# Altium schematic symbol library Altium_Library.SchLib: 822 symbols (part 5 of 17)
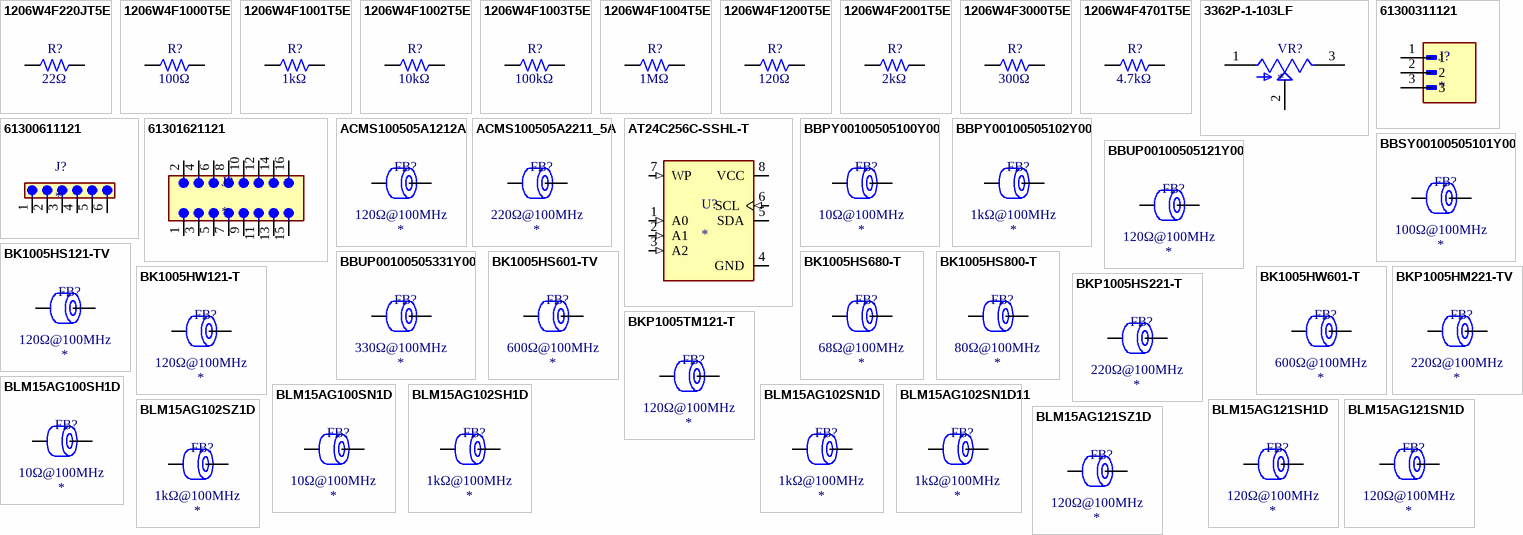
[diagram p24: symbols 1206W4F220JT5E to BLM15AG121SZ1D]

## BLM15AG102SH1D
designator FB?  Impedance @ Frequency: 1kΩ@100MHz
Ferrite, 1kΩ@100MHz, ±25%, 1Ω, 200mA, SMD 0402; Manufacturer: Murata Electronics; Manufacturer Part Number: BLM15AG102SH1D; Package Size: 0402; JLCPCB Basic Part: No; JLCPCB Part Number: C160967; Supplier 1: LCSC; Category: Ferrite Beads; Supplier Part Number 1: C160967; Tolerance: ±25%; Rated Current: 200mA; DC Resistance: 1Ω; RoHS: Yes; ComponentLink1Description: Datasheet; ComponentLink1URL: https://wmsc.lcsc.com/wmsc/upload/file/pdf/v2/lcsc/1811081514_Murata-Electronics-BLM15AG102SH1D_C160967.pdf; ComponentLink2Description: JLCPCB Part URL; ComponentLink2URL: https://jlcpcb.com/partdetail/C160967; ComponentLink3Description: LCSC Part URL; ComponentLink3URL: https://lcsc.com/product-detail/Ferrite-Beads_Murata-Electronics-Murata-Electronics-BLM15AG102SH1D_C160967.html
footprint FB-0402 (0402 (1005M) Ferrite)
pins: 1, 2

## BLM15AG102SN1D
designator FB?  Impedance @ Frequency: 1kΩ@100MHz
Ferrite, 1kΩ@100MHz, ±25%, 650mΩ, 300mA, SMD 0402; Manufacturer: Murata Electronics; Manufacturer Part Number: BLM15AG102SN1D; Package Size: 0402; JLCPCB Basic Part: No; JLCPCB Part Number: C76883; Supplier 1: LCSC; Category: Ferrite Beads; Supplier Part Number 1: C76883; Tolerance: ±25%; Rated Current: 300mA; DC Resistance: 650mΩ; RoHS: Yes; ComponentLink1Description: Datasheet; ComponentLink1URL: https://wmsc.lcsc.com/wmsc/upload/file/pdf/v2/lcsc/2304140030_Murata-Electronics-BLM15AG102SN1D_C76883.pdf; ComponentLink2Description: JLCPCB Part URL; ComponentLink2URL: https://jlcpcb.com/partdetail/C76883; ComponentLink3Description: LCSC Part URL; ComponentLink3URL: https://lcsc.com/product-detail/Ferrite-Beads_Murata-Electronics-Murata-Electronics-BLM15AG102SN1D_C76883.html
footprint FB-0402 (0402 (1005M) Ferrite)
pins: 1, 2

## BLM15AG102SN1D11
designator FB?  Impedance @ Frequency: 1kΩ@100MHz
Ferrite, 1kΩ@100MHz, ±25%, 650mΩ, 300mA, SMD 0402; Manufacturer: Murata Electronics; Manufacturer Part Number: BLM15AG102SN1D11; Package Size: 0402; JLCPCB Basic Part: No; JLCPCB Part Number: C882959; Supplier 1: LCSC; Category: Ferrite Beads; Supplier Part Number 1: C882959; Tolerance: ±25%; Rated Current: 300mA; DC Resistance: 650mΩ; RoHS: Yes; ComponentLink1Description: Datasheet; ComponentLink1URL: https://wmsc.lcsc.com/wmsc/upload/file/pdf/v2/lcsc/2011231238_Murata-Electronics-BLM15AG102SN1D11_C882959.pdf; ComponentLink2Description: JLCPCB Part URL; ComponentLink2URL: https://jlcpcb.com/partdetail/C882959; ComponentLink3Description: LCSC Part URL; ComponentLink3URL: https://lcsc.com/product-detail/Ferrite-Beads_Murata-Electronics-Murata-Electronics-BLM15AG102SN1D11_C882959.html
footprint FB-0402 (0402 (1005M) Ferrite)
pins: 1, 2

## BLM15AG102SZ1D
designator FB?  Impedance @ Frequency: 1kΩ@100MHz
Ferrite, 1kΩ@100MHz, ±25%, 650mΩ, 300mA, SMD 0402; Manufacturer: Murata Electronics; Manufacturer Part Number: BLM15AG102SZ1D; Package Size: 0402; JLCPCB Basic Part: No; JLCPCB Part Number: C710326; Supplier 1: LCSC; Category: Ferrite Beads; Supplier Part Number 1: C710326; Tolerance: ±25%; Rated Current: 300mA; DC Resistance: 650mΩ; RoHS: Yes; ComponentLink1Description: Datasheet; ComponentLink1URL: https://wmsc.lcsc.com/wmsc/upload/file/pdf/v2/lcsc/2304140030_Murata-Electronics-BLM15AG102SZ1D_C710326.pdf; ComponentLink2Description: JLCPCB Part URL; ComponentLink2URL: https://jlcpcb.com/partdetail/C710326; ComponentLink3Description: LCSC Part URL; ComponentLink3URL: https://lcsc.com/product-detail/Ferrite-Beads_Murata-Electronics-Murata-Electronics-BLM15AG102SZ1D_C710326.html
footprint FB-0402 (0402 (1005M) Ferrite)
pins: 1, 2

## BLM15AG121SH1D
designator FB?  Impedance @ Frequency: 120Ω@100MHz
Ferrite, 120Ω@100MHz, ±25%, 250mΩ, 500mA, SMD 0402; Manufacturer: Murata Electronics; Manufacturer Part Number: BLM15AG121SH1D; Package Size: 0402; JLCPCB Basic Part: No; JLCPCB Part Number: C91573; Supplier 1: LCSC; Category: Ferrite Beads; Supplier Part Number 1: C91573; Tolerance: ±25%; Rated Current: 500mA; DC Resistance: 250mΩ; RoHS: Yes; ComponentLink1Description: Datasheet; ComponentLink1URL: https://wmsc.lcsc.com/wmsc/upload/file/pdf/v2/lcsc/1810232207_Murata-Electronics-BLM15AG121SH1D_C91573.pdf; ComponentLink2Description: JLCPCB Part URL; ComponentLink2URL: https://jlcpcb.com/partdetail/C91573; ComponentLink3Description: LCSC Part URL; ComponentLink3URL: https://lcsc.com/product-detail/Ferrite-Beads_Murata-Electronics-Murata-Electronics-BLM15AG121SH1D_C91573.html
footprint FB-0402 (0402 (1005M) Ferrite)
pins: 1, 2

## BLM15AG121SN1D
designator FB?  Impedance @ Frequency: 120Ω@100MHz
Ferrite, 120Ω@100MHz, ±25%, 250mΩ, 500mA, SMD 0402; Manufacturer: Murata Electronics; Manufacturer Part Number: BLM15AG121SN1D; Package Size: 0402; JLCPCB Basic Part: No; JLCPCB Part Number: C85812; Supplier 1: LCSC; Category: Ferrite Beads; Supplier Part Number 1: C85812; Tolerance: ±25%; Rated Current: 500mA; DC Resistance: 250mΩ; RoHS: Yes; ComponentLink1Description: Datasheet; ComponentLink1URL: https://wmsc.lcsc.com/wmsc/upload/file/pdf/v2/lcsc/2304140030_Murata-Electronics-BLM15AG121SN1D_C85812.pdf; ComponentLink2Description: JLCPCB Part URL; ComponentLink2URL: https://jlcpcb.com/partdetail/C85812; ComponentLink3Description: LCSC Part URL; ComponentLink3URL: https://lcsc.com/product-detail/Ferrite-Beads_Murata-Electronics-Murata-Electronics-BLM15AG121SN1D_C85812.html
footprint FB-0402 (0402 (1005M) Ferrite)
pins: 1, 2

## BLM15AG121SZ1D
designator FB?  Impedance @ Frequency: 120Ω@100MHz
Ferrite, 120Ω@100MHz, ±25%, 190mΩ, 500mA, SMD 0402; Manufacturer: Murata Electronics; Manufacturer Part Number: BLM15AG121SZ1D; Package Size: 0402; JLCPCB Basic Part: No; JLCPCB Part Number: C2661926; Supplier 1: LCSC; Category: Ferrite Beads; Supplier Part Number 1: C2661926; Tolerance: ±25%; Rated Current: 500mA; DC Resistance: 190mΩ; RoHS: Yes; ComponentLink1Description: Datasheet; ComponentLink1URL: https://wmsc.lcsc.com/wmsc/upload/file/pdf/v2/lcsc/2108070930_Murata-Electronics-BLM15AG121SZ1D_C2661926.pdf; ComponentLink2Description: JLCPCB Part URL; ComponentLink2URL: https://jlcpcb.com/partdetail/C2661926; ComponentLink3Description: LCSC Part URL; ComponentLink3URL: https://lcsc.com/product-detail/Ferrite-Beads_Murata-Electronics-Murata-Electronics-BLM15AG121SZ1D_C2661926.html
footprint FB-0402 (0402 (1005M) Ferrite)
pins: 1, 2

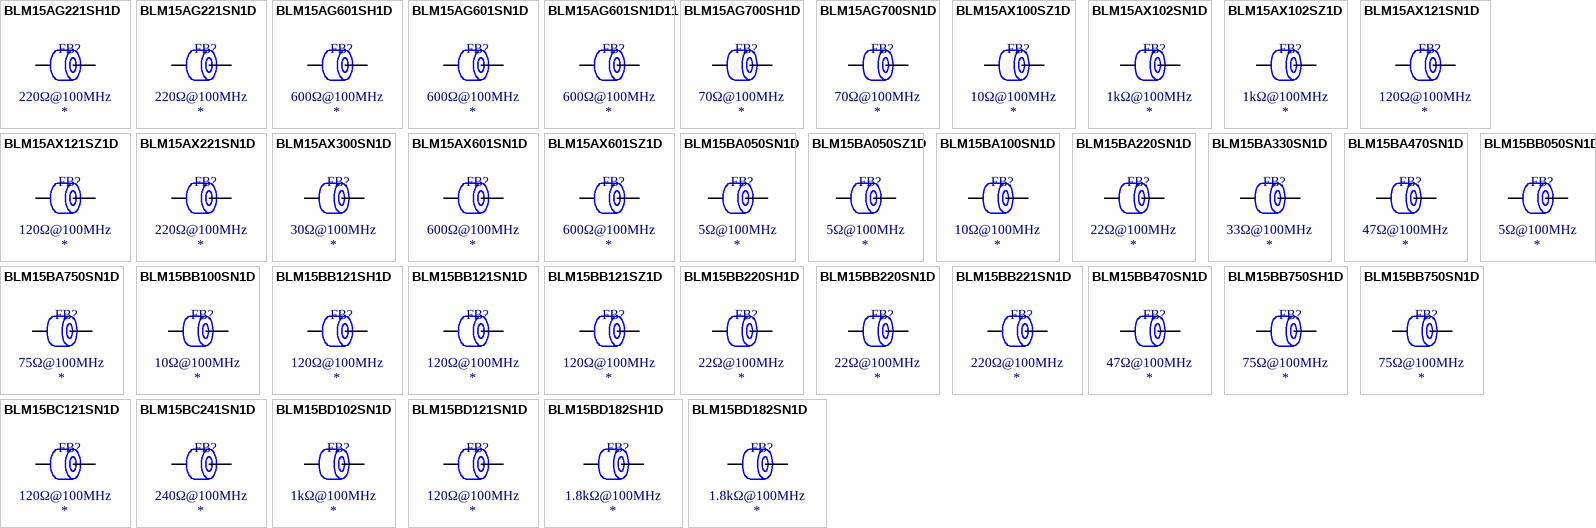
[diagram p6: symbols BLM15AG221SH1D to BLM15BD182SN1D]

## BLM15AG221SH1D
designator FB?  Impedance @ Frequency: 220Ω@100MHz
Ferrite, 220Ω@100MHz, 350mΩ, SMD 0402; Manufacturer: Murata Electronics; Manufacturer Part Number: BLM15AG221SH1D; Package Size: 0402; JLCPCB Basic Part: No; JLCPCB Part Number: C269768; Supplier 1: LCSC; Category: Ferrite Beads; Supplier Part Number 1: C269768; DC Resistance: 350mΩ; RoHS: Yes; ComponentLink1Description: Datasheet; ComponentLink1URL: https://wmsc.lcsc.com/wmsc/upload/file/pdf/v2/lcsc/2207251801_Murata-Electronics-BLM15AG221SH1D_C269768.pdf; ComponentLink2Description: JLCPCB Part URL; ComponentLink2URL: https://jlcpcb.com/partdetail/C269768; ComponentLink3Description: LCSC Part URL; ComponentLink3URL: https://lcsc.com/product-detail/Ferrite-Beads_Murata-Electronics-Murata-Electronics-BLM15AG221SH1D_C269768.html
footprint FB-0402 (0402 (1005M) Ferrite)
pins: 1, 2

## BLM15AG221SN1D
designator FB?  Impedance @ Frequency: 220Ω@100MHz
Ferrite, 220Ω@100MHz, ±25%, 290mΩ, 450mA, SMD 0402; Manufacturer: Murata Electronics; Manufacturer Part Number: BLM15AG221SN1D; Package Size: 0402; JLCPCB Basic Part: No; JLCPCB Part Number: C85813; Supplier 1: LCSC; Category: Ferrite Beads; Supplier Part Number 1: C85813; Tolerance: ±25%; Rated Current: 450mA; DC Resistance: 290mΩ; RoHS: Yes; ComponentLink1Description: Datasheet; ComponentLink1URL: https://wmsc.lcsc.com/wmsc/upload/file/pdf/v2/lcsc/2304140030_Murata-Electronics-BLM15AG221SN1D_C85813.pdf; ComponentLink2Description: JLCPCB Part URL; ComponentLink2URL: https://jlcpcb.com/partdetail/C85813; ComponentLink3Description: LCSC Part URL; ComponentLink3URL: https://lcsc.com/product-detail/Ferrite-Beads_Murata-Electronics-Murata-Electronics-BLM15AG221SN1D_C85813.html
footprint FB-0402 (0402 (1005M) Ferrite)
pins: 1, 2

## BLM15AG601SH1D
designator FB?  Impedance @ Frequency: 600Ω@100MHz
Ferrite, 600Ω@100MHz, ±25%, 600mΩ, 300mA, SMD 0402; Manufacturer: Murata Electronics; Manufacturer Part Number: BLM15AG601SH1D; Package Size: 0402; JLCPCB Basic Part: No; JLCPCB Part Number: C525480; Supplier 1: LCSC; Category: Ferrite Beads; Supplier Part Number 1: C525480; Tolerance: ±25%; Rated Current: 300mA; DC Resistance: 600mΩ; RoHS: Yes; ComponentLink1Description: Datasheet; ComponentLink1URL: https://wmsc.lcsc.com/wmsc/upload/file/pdf/v2/lcsc/2304140030_Murata-Electronics-BLM15AG601SH1D_C525480.pdf; ComponentLink2Description: JLCPCB Part URL; ComponentLink2URL: https://jlcpcb.com/partdetail/C525480; ComponentLink3Description: LCSC Part URL; ComponentLink3URL: https://lcsc.com/product-detail/Ferrite-Beads_Murata-Electronics-Murata-Electronics-BLM15AG601SH1D_C525480.html
footprint FB-0402 (0402 (1005M) Ferrite)
pins: 1, 2

## BLM15AG601SN1D
designator FB?  Impedance @ Frequency: 600Ω@100MHz
Ferrite, 600Ω@100MHz, ±25%, 520mΩ, 300mA, SMD 0402; Manufacturer: Murata Electronics; Manufacturer Part Number: BLM15AG601SN1D; Package Size: 0402; JLCPCB Basic Part: No; JLCPCB Part Number: C76884; Supplier 1: LCSC; Category: Ferrite Beads; Supplier Part Number 1: C76884; Tolerance: ±25%; Rated Current: 300mA; DC Resistance: 520mΩ; RoHS: Yes; ComponentLink1Description: Datasheet; ComponentLink1URL: https://wmsc.lcsc.com/wmsc/upload/file/pdf/v2/lcsc/2304140030_Murata-Electronics-BLM15AG601SN1D_C76884.pdf; ComponentLink2Description: JLCPCB Part URL; ComponentLink2URL: https://jlcpcb.com/partdetail/C76884; ComponentLink3Description: LCSC Part URL; ComponentLink3URL: https://lcsc.com/product-detail/Ferrite-Beads_Murata-Electronics-Murata-Electronics-BLM15AG601SN1D_C76884.html
footprint FB-0402 (0402 (1005M) Ferrite)
pins: 1, 2

## BLM15AG601SN1D11
designator FB?  Impedance @ Frequency: 600Ω@100MHz
Ferrite, 600Ω@100MHz, ±25%, 520mΩ, 300mA, SMD 0402; Manufacturer: Murata Electronics; Manufacturer Part Number: BLM15AG601SN1D11; Package Size: 0402; JLCPCB Basic Part: No; JLCPCB Part Number: C560060; Supplier 1: LCSC; Category: Ferrite Beads; Supplier Part Number 1: C560060; Tolerance: ±25%; Rated Current: 300mA; DC Resistance: 520mΩ; RoHS: Yes; ComponentLink1Description: Datasheet; ComponentLink1URL: https://wmsc.lcsc.com/wmsc/upload/file/pdf/v2/lcsc/2009211907_Murata-Electronics-BLM15AG601SN1D11_C560060.pdf; ComponentLink2Description: JLCPCB Part URL; ComponentLink2URL: https://jlcpcb.com/partdetail/C560060; ComponentLink3Description: LCSC Part URL; ComponentLink3URL: https://lcsc.com/product-detail/Ferrite-Beads_Murata-Electronics-Murata-Electronics-BLM15AG601SN1D11_C560060.html
footprint FB-0402 (0402 (1005M) Ferrite)
pins: 1, 2

## BLM15AG700SH1D
designator FB?  Impedance @ Frequency: 70Ω@100MHz
Ferrite, 70Ω@100MHz, ±25%, 150mΩ, 500mA, SMD 0402; Manufacturer: Murata Electronics; Manufacturer Part Number: BLM15AG700SH1D; Package Size: 0402; JLCPCB Basic Part: No; JLCPCB Part Number: C527985; Supplier 1: LCSC; Category: Ferrite Beads; Supplier Part Number 1: C527985; Tolerance: ±25%; Rated Current: 500mA; DC Resistance: 150mΩ; RoHS: Yes; ComponentLink1Description: Datasheet; ComponentLink1URL: https://wmsc.lcsc.com/wmsc/upload/file/pdf/v2/lcsc/2304140030_Murata-Electronics-BLM15AG700SH1D_C527985.pdf; ComponentLink2Description: JLCPCB Part URL; ComponentLink2URL: https://jlcpcb.com/partdetail/C527985; ComponentLink3Description: LCSC Part URL; ComponentLink3URL: https://lcsc.com/product-detail/Ferrite-Beads_Murata-Electronics-Murata-Electronics-BLM15AG700SH1D_C527985.html
footprint FB-0402 (0402 (1005M) Ferrite)
pins: 1, 2

## BLM15AG700SN1D
designator FB?  Impedance @ Frequency: 70Ω@100MHz
Ferrite, 70Ω@100MHz, ±25%, 150mΩ, 600mA, SMD 0402; Manufacturer: Murata Electronics; Manufacturer Part Number: BLM15AG700SN1D; Package Size: 0402; JLCPCB Basic Part: No; JLCPCB Part Number: C85814; Supplier 1: LCSC; Category: Ferrite Beads; Supplier Part Number 1: C85814; Tolerance: ±25%; Rated Current: 600mA; DC Resistance: 150mΩ; RoHS: Yes; ComponentLink1Description: Datasheet; ComponentLink1URL: https://wmsc.lcsc.com/wmsc/upload/file/pdf/v2/lcsc/2304140030_Murata-Electronics-BLM15AG700SN1D_C85814.pdf; ComponentLink2Description: JLCPCB Part URL; ComponentLink2URL: https://jlcpcb.com/partdetail/C85814; ComponentLink3Description: LCSC Part URL; ComponentLink3URL: https://lcsc.com/product-detail/Ferrite-Beads_Murata-Electronics-Murata-Electronics-BLM15AG700SN1D_C85814.html
footprint FB-0402 (0402 (1005M) Ferrite)
pins: 1, 2

## BLM15AX100SZ1D
designator FB?  Impedance @ Frequency: 10Ω@100MHz
Ferrite, 10Ω@100MHz, ±25%, 15mΩ, 1.74A, SMD 0402; Manufacturer: Murata Electronics; Manufacturer Part Number: BLM15AX100SZ1D; Package Size: 0402; JLCPCB Basic Part: No; JLCPCB Part Number: C2661896; Supplier 1: LCSC; Category: Ferrite Beads; Supplier Part Number 1: C2661896; Tolerance: ±25%; Rated Current: 1.74A; DC Resistance: 15mΩ; RoHS: Yes; ComponentLink1Description: Datasheet; ComponentLink1URL: https://wmsc.lcsc.com/wmsc/upload/file/pdf/v2/lcsc/2304140030_Murata-Electronics-BLM15AX100SZ1D_C2661896.pdf; ComponentLink2Description: JLCPCB Part URL; ComponentLink2URL: https://jlcpcb.com/partdetail/C2661896; ComponentLink3Description: LCSC Part URL; ComponentLink3URL: https://lcsc.com/product-detail/Ferrite-Beads_Murata-Electronics-Murata-Electronics-BLM15AX100SZ1D_C2661896.html
footprint FB-0402 (0402 (1005M) Ferrite)
pins: 1, 2

## BLM15AX102SN1D
designator FB?  Impedance @ Frequency: 1kΩ@100MHz
Ferrite, 1kΩ@100MHz, ±25%, 490mΩ, 350mA, SMD 0402; Manufacturer: Murata Electronics; Manufacturer Part Number: BLM15AX102SN1D; Package Size: 0402; JLCPCB Basic Part: No; JLCPCB Part Number: C85815; Supplier 1: LCSC; Category: Ferrite Beads; Supplier Part Number 1: C85815; Tolerance: ±25%; Rated Current: 350mA; DC Resistance: 490mΩ; RoHS: Yes; ComponentLink1Description: Datasheet; ComponentLink1URL: https://wmsc.lcsc.com/wmsc/upload/file/pdf/v2/lcsc/2304140030_Murata-Electronics-BLM15AX102SN1D_C85815.pdf; ComponentLink2Description: JLCPCB Part URL; ComponentLink2URL: https://jlcpcb.com/partdetail/C85815; ComponentLink3Description: LCSC Part URL; ComponentLink3URL: https://lcsc.com/product-detail/Ferrite-Beads_Murata-Electronics-Murata-Electronics-BLM15AX102SN1D_C85815.html
footprint FB-0402 (0402 (1005M) Ferrite)
pins: 1, 2

## BLM15AX102SZ1D
designator FB?  Impedance @ Frequency: 1kΩ@100MHz
Ferrite, 1kΩ@100MHz, ±25%, 490mΩ, 350mA, SMD 0402; Manufacturer: Murata Electronics; Manufacturer Part Number: BLM15AX102SZ1D; Package Size: 0402; JLCPCB Basic Part: No; JLCPCB Part Number: C710329; Supplier 1: LCSC; Category: Ferrite Beads; Supplier Part Number 1: C710329; Tolerance: ±25%; Rated Current: 350mA; DC Resistance: 490mΩ; RoHS: Yes; ComponentLink1Description: Datasheet; ComponentLink1URL: https://wmsc.lcsc.com/wmsc/upload/file/pdf/v2/lcsc/2304140030_Murata-Electronics-BLM15AX102SZ1D_C710329.pdf; ComponentLink2Description: JLCPCB Part URL; ComponentLink2URL: https://jlcpcb.com/partdetail/C710329; ComponentLink3Description: LCSC Part URL; ComponentLink3URL: https://lcsc.com/product-detail/Ferrite-Beads_Murata-Electronics-Murata-Electronics-BLM15AX102SZ1D_C710329.html
footprint FB-0402 (0402 (1005M) Ferrite)
pins: 1, 2

## BLM15AX121SN1D
designator FB?  Impedance @ Frequency: 120Ω@100MHz
Ferrite, 120Ω@100MHz, ±25%, 130mΩ, 700mA, SMD 0402; Manufacturer: Murata Electronics; Manufacturer Part Number: BLM15AX121SN1D; Package Size: 0402; JLCPCB Basic Part: No; JLCPCB Part Number: C337873; Supplier 1: LCSC; Category: Ferrite Beads; Supplier Part Number 1: C337873; Tolerance: ±25%; Rated Current: 700mA; DC Resistance: 130mΩ; RoHS: Yes; ComponentLink1Description: Datasheet; ComponentLink1URL: https://wmsc.lcsc.com/wmsc/upload/file/pdf/v2/lcsc/2304140030_Murata-Electronics-BLM15AX121SN1D_C337873.pdf; ComponentLink2Description: JLCPCB Part URL; ComponentLink2URL: https://jlcpcb.com/partdetail/C337873; ComponentLink3Description: LCSC Part URL; ComponentLink3URL: https://lcsc.com/product-detail/Ferrite-Beads_Murata-Electronics-Murata-Electronics-BLM15AX121SN1D_C337873.html
footprint FB-0402 (0402 (1005M) Ferrite)
pins: 1, 2

## BLM15AX121SZ1D
designator FB?  Impedance @ Frequency: 120Ω@100MHz
Ferrite, 120Ω@100MHz, ±25%, 130mΩ, 700mA, SMD 0402; Manufacturer: Murata Electronics; Manufacturer Part Number: BLM15AX121SZ1D; Package Size: 0402; JLCPCB Basic Part: No; JLCPCB Part Number: C2661657; Supplier 1: LCSC; Category: Ferrite Beads; Supplier Part Number 1: C2661657; Tolerance: ±25%; Rated Current: 700mA; DC Resistance: 130mΩ; RoHS: Yes; ComponentLink1Description: Datasheet; ComponentLink1URL: https://wmsc.lcsc.com/wmsc/upload/file/pdf/v2/lcsc/2304140030_Murata-Electronics-BLM15AX121SZ1D_C2661657.pdf; ComponentLink2Description: JLCPCB Part URL; ComponentLink2URL: https://jlcpcb.com/partdetail/C2661657; ComponentLink3Description: LCSC Part URL; ComponentLink3URL: https://lcsc.com/product-detail/Ferrite-Beads_Murata-Electronics-Murata-Electronics-BLM15AX121SZ1D_C2661657.html
footprint FB-0402 (0402 (1005M) Ferrite)
pins: 1, 2

## BLM15AX221SN1D
designator FB?  Impedance @ Frequency: 220Ω@100MHz
Ferrite, 220Ω@100MHz, ±25%, 180mΩ, 600mA, SMD 0402; Manufacturer: Murata Electronics; Manufacturer Part Number: BLM15AX221SN1D; Package Size: 0402; JLCPCB Basic Part: No; JLCPCB Part Number: C76885; Supplier 1: LCSC; Category: Ferrite Beads; Supplier Part Number 1: C76885; Tolerance: ±25%; Rated Current: 600mA; DC Resistance: 180mΩ; RoHS: Yes; ComponentLink1Description: Datasheet; ComponentLink1URL: https://wmsc.lcsc.com/wmsc/upload/file/pdf/v2/lcsc/2304140030_Murata-Electronics-BLM15AX221SN1D_C76885.pdf; ComponentLink2Description: JLCPCB Part URL; ComponentLink2URL: https://jlcpcb.com/partdetail/C76885; ComponentLink3Description: LCSC Part URL; ComponentLink3URL: https://lcsc.com/product-detail/Ferrite-Beads_Murata-Electronics-Murata-Electronics-BLM15AX221SN1D_C76885.html
footprint FB-0402 (0402 (1005M) Ferrite)
pins: 1, 2

## BLM15AX300SN1D
designator FB?  Impedance @ Frequency: 30Ω@100MHz
Ferrite, 30Ω@100MHz, ±25%, 60mΩ, 1.1A, SMD 0402; Manufacturer: Murata Electronics; Manufacturer Part Number: BLM15AX300SN1D; Package Size: 0402; JLCPCB Basic Part: No; JLCPCB Part Number: C71813; Supplier 1: LCSC; Category: Ferrite Beads; Supplier Part Number 1: C71813; Tolerance: ±25%; Rated Current: 1.1A; DC Resistance: 60mΩ; RoHS: Yes; ComponentLink1Description: Datasheet; ComponentLink1URL: https://wmsc.lcsc.com/wmsc/upload/file/pdf/v2/lcsc/2304140030_Murata-Electronics-BLM15AX300SN1D_C71813.pdf; ComponentLink2Description: JLCPCB Part URL; ComponentLink2URL: https://jlcpcb.com/partdetail/C71813; ComponentLink3Description: LCSC Part URL; ComponentLink3URL: https://lcsc.com/product-detail/Ferrite-Beads_Murata-Electronics-Murata-Electronics-BLM15AX300SN1D_C71813.html
footprint FB-0402 (0402 (1005M) Ferrite)
pins: 1, 2

## BLM15AX601SN1D
designator FB?  Impedance @ Frequency: 600Ω@100MHz
Ferrite, 600Ω@100MHz, ±25%, 340mΩ, 500mA, SMD 0402; Manufacturer: Murata Electronics; Manufacturer Part Number: BLM15AX601SN1D; Package Size: 0402; JLCPCB Basic Part: No; JLCPCB Part Number: C76886; Supplier 1: LCSC; Category: Ferrite Beads; Supplier Part Number 1: C76886; Tolerance: ±25%; Rated Current: 500mA; DC Resistance: 340mΩ; RoHS: Yes; ComponentLink1Description: Datasheet; ComponentLink1URL: https://wmsc.lcsc.com/wmsc/upload/file/pdf/v2/lcsc/2304140030_Murata-Electronics-BLM15AX601SN1D_C76886.pdf; ComponentLink2Description: JLCPCB Part URL; ComponentLink2URL: https://jlcpcb.com/partdetail/C76886; ComponentLink3Description: LCSC Part URL; ComponentLink3URL: https://lcsc.com/product-detail/Ferrite-Beads_Murata-Electronics-Murata-Electronics-BLM15AX601SN1D_C76886.html
footprint FB-0402 (0402 (1005M) Ferrite)
pins: 1, 2

## BLM15AX601SZ1D
designator FB?  Impedance @ Frequency: 600Ω@100MHz
Ferrite, 600Ω@100MHz, ±25%, 340mΩ, 500mA, SMD 0402; Manufacturer: Murata Electronics; Manufacturer Part Number: BLM15AX601SZ1D; Package Size: 0402; JLCPCB Basic Part: No; JLCPCB Part Number: C710330; Supplier 1: LCSC; Category: Ferrite Beads; Supplier Part Number 1: C710330; Tolerance: ±25%; Rated Current: 500mA; DC Resistance: 340mΩ; RoHS: Yes; ComponentLink1Description: Datasheet; ComponentLink1URL: https://wmsc.lcsc.com/wmsc/upload/file/pdf/v2/lcsc/2304140030_Murata-Electronics-BLM15AX601SZ1D_C710330.pdf; ComponentLink2Description: JLCPCB Part URL; ComponentLink2URL: https://jlcpcb.com/partdetail/C710330; ComponentLink3Description: LCSC Part URL; ComponentLink3URL: https://lcsc.com/product-detail/Ferrite-Beads_Murata-Electronics-Murata-Electronics-BLM15AX601SZ1D_C710330.html
footprint FB-0402 (0402 (1005M) Ferrite)
pins: 1, 2

## BLM15BA050SN1D
designator FB?  Impedance @ Frequency: 5Ω@100MHz
Ferrite, 5Ω@100MHz, ±25%, 300mΩ, 100mA, SMD 0402; Manufacturer: Murata Electronics; Manufacturer Part Number: BLM15BA050SN1D; Package Size: 0402; JLCPCB Basic Part: No; JLCPCB Part Number: C160969; Supplier 1: LCSC; Category: Ferrite Beads; Supplier Part Number 1: C160969; Tolerance: ±25%; Rated Current: 100mA; DC Resistance: 300mΩ; RoHS: Yes; ComponentLink1Description: Datasheet; ComponentLink1URL: https://wmsc.lcsc.com/wmsc/upload/file/pdf/v2/lcsc/1811081533_Murata-Electronics-BLM15BA050SN1D_C160969.pdf; ComponentLink2Description: JLCPCB Part URL; ComponentLink2URL: https://jlcpcb.com/partdetail/C160969; ComponentLink3Description: LCSC Part URL; ComponentLink3URL: https://lcsc.com/product-detail/Ferrite-Beads_Murata-Electronics-Murata-Electronics-BLM15BA050SN1D_C160969.html
footprint FB-0402 (0402 (1005M) Ferrite)
pins: 1, 2

## BLM15BA050SZ1D
designator FB?  Impedance @ Frequency: 5Ω@100MHz
Ferrite, 5Ω@100MHz, ±25%, 150mΩ, 300mA, SMD 0402; Manufacturer: Murata Electronics; Manufacturer Part Number: BLM15BA050SZ1D; Package Size: 0402; JLCPCB Basic Part: No; JLCPCB Part Number: C2941921; Supplier 1: LCSC; Category: Ferrite Beads; Supplier Part Number 1: C2941921; Tolerance: ±25%; Rated Current: 300mA; DC Resistance: 150mΩ; RoHS: Yes; ComponentLink1Description: Datasheet; ComponentLink1URL: https://wmsc.lcsc.com/wmsc/upload/file/pdf/v2/lcsc/2201131730_Murata-Electronics-BLM15BA050SZ1D_C2941921.pdf; ComponentLink2Description: JLCPCB Part URL; ComponentLink2URL: https://jlcpcb.com/partdetail/C2941921; ComponentLink3Description: LCSC Part URL; ComponentLink3URL: https://lcsc.com/product-detail/Ferrite-Beads_Murata-Electronics-Murata-Electronics-BLM15BA050SZ1D_C2941921.html
footprint FB-0402 (0402 (1005M) Ferrite)
pins: 1, 2

## BLM15BA100SN1D
designator FB?  Impedance @ Frequency: 10Ω@100MHz
Ferrite, 10Ω@100MHz, ±25%, 200mΩ, 300mA, SMD 0402; Manufacturer: Murata Electronics; Manufacturer Part Number: BLM15BA100SN1D; Package Size: 0402; JLCPCB Basic Part: No; JLCPCB Part Number: C113007; Supplier 1: LCSC; Category: Ferrite Beads; Supplier Part Number 1: C113007; Tolerance: ±25%; Rated Current: 300mA; DC Resistance: 200mΩ; RoHS: Yes; ComponentLink1Description: Datasheet; ComponentLink1URL: https://wmsc.lcsc.com/wmsc/upload/file/pdf/v2/lcsc/2304140030_Murata-Electronics-BLM15BA100SN1D_C113007.pdf; ComponentLink2Description: JLCPCB Part URL; ComponentLink2URL: https://jlcpcb.com/partdetail/C113007; ComponentLink3Description: LCSC Part URL; ComponentLink3URL: https://lcsc.com/product-detail/Ferrite-Beads_Murata-Electronics-Murata-Electronics-BLM15BA100SN1D_C113007.html
footprint FB-0402 (0402 (1005M) Ferrite)
pins: 1, 2

## BLM15BA220SN1D
designator FB?  Impedance @ Frequency: 22Ω@100MHz
Ferrite, 22Ω@100MHz, ±25%, 300mΩ, 300mA, SMD 0402; Manufacturer: Murata Electronics; Manufacturer Part Number: BLM15BA220SN1D; Package Size: 0402; JLCPCB Basic Part: No; JLCPCB Part Number: C85816; Supplier 1: LCSC; Category: Ferrite Beads; Supplier Part Number 1: C85816; Tolerance: ±25%; Rated Current: 300mA; DC Resistance: 300mΩ; RoHS: Yes; ComponentLink1Description: Datasheet; ComponentLink1URL: https://wmsc.lcsc.com/wmsc/upload/file/pdf/v2/lcsc/2304140030_Murata-Electronics-BLM15BA220SN1D_C85816.pdf; ComponentLink2Description: JLCPCB Part URL; ComponentLink2URL: https://jlcpcb.com/partdetail/C85816; ComponentLink3Description: LCSC Part URL; ComponentLink3URL: https://lcsc.com/product-detail/Ferrite-Beads_Murata-Electronics-Murata-Electronics-BLM15BA220SN1D_C85816.html
footprint FB-0402 (0402 (1005M) Ferrite)
pins: 1, 2

## BLM15BA330SN1D
designator FB?  Impedance @ Frequency: 33Ω@100MHz
Ferrite, 33Ω@100MHz, ±25%, 400mΩ, 300mA, SMD 0402; Manufacturer: Murata Electronics; Manufacturer Part Number: BLM15BA330SN1D; Package Size: 0402; JLCPCB Basic Part: No; JLCPCB Part Number: C88961; Supplier 1: LCSC; Category: Ferrite Beads; Supplier Part Number 1: C88961; Tolerance: ±25%; Rated Current: 300mA; DC Resistance: 400mΩ; RoHS: Yes; ComponentLink1Description: Datasheet; ComponentLink1URL: https://wmsc.lcsc.com/wmsc/upload/file/pdf/v2/lcsc/2304140030_Murata-Electronics-BLM15BA330SN1D_C88961.pdf; ComponentLink2Description: JLCPCB Part URL; ComponentLink2URL: https://jlcpcb.com/partdetail/C88961; ComponentLink3Description: LCSC Part URL; ComponentLink3URL: https://lcsc.com/product-detail/Ferrite-Beads_Murata-Electronics-Murata-Electronics-BLM15BA330SN1D_C88961.html
footprint FB-0402 (0402 (1005M) Ferrite)
pins: 1, 2

## BLM15BA470SN1D
designator FB?  Impedance @ Frequency: 47Ω@100MHz
Ferrite, 47Ω@100MHz, ±25%, 600mΩ, 200mA, SMD 0402; Manufacturer: Murata Electronics; Manufacturer Part Number: BLM15BA470SN1D; Package Size: 0402; JLCPCB Basic Part: No; JLCPCB Part Number: C397297; Supplier 1: LCSC; Category: Ferrite Beads; Supplier Part Number 1: C397297; Tolerance: ±25%; Rated Current: 200mA; DC Resistance: 600mΩ; RoHS: Yes; ComponentLink1Description: Datasheet; ComponentLink1URL: https://wmsc.lcsc.com/wmsc/upload/file/pdf/v2/lcsc/2304140030_Murata-Electronics-BLM15BA470SN1D_C397297.pdf; ComponentLink2Description: JLCPCB Part URL; ComponentLink2URL: https://jlcpcb.com/partdetail/C397297; ComponentLink3Description: LCSC Part URL; ComponentLink3URL: https://lcsc.com/product-detail/Ferrite-Beads_Murata-Electronics-Murata-Electronics-BLM15BA470SN1D_C397297.html
footprint FB-0402 (0402 (1005M) Ferrite)
pins: 1, 2

## BLM15BA750SN1D
designator FB?  Impedance @ Frequency: 75Ω@100MHz
Ferrite, 75Ω@100MHz, ±25%, 800mΩ, 200mA, SMD 0402; Manufacturer: Murata Electronics; Manufacturer Part Number: BLM15BA750SN1D; Package Size: 0402; JLCPCB Basic Part: No; JLCPCB Part Number: C701308; Supplier 1: LCSC; Category: Ferrite Beads; Supplier Part Number 1: C701308; Tolerance: ±25%; Rated Current: 200mA; DC Resistance: 800mΩ; RoHS: Yes; ComponentLink1Description: Datasheet; ComponentLink1URL: https://wmsc.lcsc.com/wmsc/upload/file/pdf/v2/lcsc/2009291136_Murata-Electronics-BLM15BA750SN1D_C701308.pdf; ComponentLink2Description: JLCPCB Part URL; ComponentLink2URL: https://jlcpcb.com/partdetail/C701308; ComponentLink3Description: LCSC Part URL; ComponentLink3URL: https://lcsc.com/product-detail/Ferrite-Beads_Murata-Electronics-Murata-Electronics-BLM15BA750SN1D_C701308.html
footprint FB-0402 (0402 (1005M) Ferrite)
pins: 1, 2

## BLM15BB050SN1D
designator FB?  Impedance @ Frequency: 5Ω@100MHz
Ferrite, 5Ω@100MHz, 80mΩ, SMD 0402; Manufacturer: Murata Electronics; Manufacturer Part Number: BLM15BB050SN1D; Package Size: 0402; JLCPCB Basic Part: No; JLCPCB Part Number: C701307; Supplier 1: LCSC; Category: Ferrite Beads; Supplier Part Number 1: C701307; DC Resistance: 80mΩ; RoHS: Yes; ComponentLink1Description: Datasheet; ComponentLink1URL: https://wmsc.lcsc.com/wmsc/upload/file/pdf/v2/lcsc/2304140030_Murata-Electronics-BLM15BB050SN1D_C701307.pdf; ComponentLink2Description: JLCPCB Part URL; ComponentLink2URL: https://jlcpcb.com/partdetail/C701307; ComponentLink3Description: LCSC Part URL; ComponentLink3URL: https://lcsc.com/product-detail/Ferrite-Beads_Murata-Electronics-Murata-Electronics-BLM15BB050SN1D_C701307.html
footprint FB-0402 (0402 (1005M) Ferrite)
pins: 1, 2

## BLM15BB100SN1D
designator FB?  Impedance @ Frequency: 10Ω@100MHz
Ferrite, 10Ω@100MHz, ±25%, 100mΩ, 300mA, SMD 0402; Manufacturer: Murata Electronics; Manufacturer Part Number: BLM15BB100SN1D; Package Size: 0402; JLCPCB Basic Part: No; JLCPCB Part Number: C113008; Supplier 1: LCSC; Category: Ferrite Beads; Supplier Part Number 1: C113008; Tolerance: ±25%; Rated Current: 300mA; DC Resistance: 100mΩ; RoHS: Yes; ComponentLink1Description: Datasheet; ComponentLink1URL: https://wmsc.lcsc.com/wmsc/upload/file/pdf/v2/lcsc/1811081517_Murata-Electronics-BLM15BB100SN1D_C113008.pdf; ComponentLink2Description: JLCPCB Part URL; ComponentLink2URL: https://jlcpcb.com/partdetail/C113008; ComponentLink3Description: LCSC Part URL; ComponentLink3URL: https://lcsc.com/product-detail/Ferrite-Beads_Murata-Electronics-Murata-Electronics-BLM15BB100SN1D_C113008.html
footprint FB-0402 (0402 (1005M) Ferrite)
pins: 1, 2

## BLM15BB121SH1D
designator FB?  Impedance @ Frequency: 120Ω@100MHz
Ferrite, 120Ω@100MHz, ±25%, 550mΩ, 300mA, SMD 0402; Manufacturer: Murata Electronics; Manufacturer Part Number: BLM15BB121SH1D; Package Size: 0402; JLCPCB Basic Part: No; JLCPCB Part Number: C882963; Supplier 1: LCSC; Category: Ferrite Beads; Supplier Part Number 1: C882963; Tolerance: ±25%; Rated Current: 300mA; DC Resistance: 550mΩ; RoHS: Yes; ComponentLink1Description: Datasheet; ComponentLink1URL: https://wmsc.lcsc.com/wmsc/upload/file/pdf/v2/lcsc/2201242130_Murata-Electronics-BLM15BB121SH1D_C882963.pdf; ComponentLink2Description: JLCPCB Part URL; ComponentLink2URL: https://jlcpcb.com/partdetail/C882963; ComponentLink3Description: LCSC Part URL; ComponentLink3URL: https://lcsc.com/product-detail/Ferrite-Beads_Murata-Electronics-Murata-Electronics-BLM15BB121SH1D_C882963.html
footprint FB-0402 (0402 (1005M) Ferrite)
pins: 1, 2

## BLM15BB121SN1D
designator FB?  Impedance @ Frequency: 120Ω@100MHz
Ferrite, 120Ω@100MHz, ±25%, 550mΩ, 300mA, SMD 0402; Manufacturer: Murata Electronics; Manufacturer Part Number: BLM15BB121SN1D; Package Size: 0402; JLCPCB Basic Part: No; JLCPCB Part Number: C85817; Supplier 1: LCSC; Category: Ferrite Beads; Supplier Part Number 1: C85817; Tolerance: ±25%; Rated Current: 300mA; DC Resistance: 550mΩ; RoHS: Yes; ComponentLink1Description: Datasheet; ComponentLink1URL: https://wmsc.lcsc.com/wmsc/upload/file/pdf/v2/lcsc/2304140030_Murata-Electronics-BLM15BB121SN1D_C85817.pdf; ComponentLink2Description: JLCPCB Part URL; ComponentLink2URL: https://jlcpcb.com/partdetail/C85817; ComponentLink3Description: LCSC Part URL; ComponentLink3URL: https://lcsc.com/product-detail/Ferrite-Beads_Murata-Electronics-Murata-Electronics-BLM15BB121SN1D_C85817.html
footprint FB-0402 (0402 (1005M) Ferrite)
pins: 1, 2

## BLM15BB121SZ1D
designator FB?  Impedance @ Frequency: 120Ω@100MHz
Ferrite, 120Ω@100MHz, ±25%, 550mΩ, 300mA, SMD 0402; Manufacturer: Murata Electronics; Manufacturer Part Number: BLM15BB121SZ1D; Package Size: 0402; JLCPCB Basic Part: No; JLCPCB Part Number: C882969; Supplier 1: LCSC; Category: Ferrite Beads; Supplier Part Number 1: C882969; Tolerance: ±25%; Rated Current: 300mA; DC Resistance: 550mΩ; RoHS: Yes; ComponentLink1Description: Datasheet; ComponentLink1URL: https://wmsc.lcsc.com/wmsc/upload/file/pdf/v2/lcsc/2201242130_Murata-Electronics-BLM15BB121SZ1D_C882969.pdf; ComponentLink2Description: JLCPCB Part URL; ComponentLink2URL: https://jlcpcb.com/partdetail/C882969; ComponentLink3Description: LCSC Part URL; ComponentLink3URL: https://lcsc.com/product-detail/Ferrite-Beads_Murata-Electronics-Murata-Electronics-BLM15BB121SZ1D_C882969.html
footprint FB-0402 (0402 (1005M) Ferrite)
pins: 1, 2

## BLM15BB220SH1D
designator FB?  Impedance @ Frequency: 22Ω@100MHz
Ferrite, 22Ω@100MHz, ±25%, 200mΩ, 300mA, SMD 0402; Manufacturer: Murata Electronics; Manufacturer Part Number: BLM15BB220SH1D; Package Size: 0402; JLCPCB Basic Part: No; JLCPCB Part Number: C907947; Supplier 1: LCSC; Category: Ferrite Beads; Supplier Part Number 1: C907947; Tolerance: ±25%; Rated Current: 300mA; DC Resistance: 200mΩ; RoHS: Yes; ComponentLink1Description: Datasheet; ComponentLink1URL: https://wmsc.lcsc.com/wmsc/upload/file/pdf/v2/lcsc/2304140030_Murata-Electronics-BLM15BB220SH1D_C907947.pdf; ComponentLink2Description: JLCPCB Part URL; ComponentLink2URL: https://jlcpcb.com/partdetail/C907947; ComponentLink3Description: LCSC Part URL; ComponentLink3URL: https://lcsc.com/product-detail/Ferrite-Beads_Murata-Electronics-Murata-Electronics-BLM15BB220SH1D_C907947.html
footprint FB-0402 (0402 (1005M) Ferrite)
pins: 1, 2

## BLM15BB220SN1D
designator FB?  Impedance @ Frequency: 22Ω@100MHz
Ferrite, 22Ω@100MHz, ±25%, 200mΩ, 300mA, SMD 0402; Manufacturer: Murata Electronics; Manufacturer Part Number: BLM15BB220SN1D; Package Size: 0402; JLCPCB Basic Part: No; JLCPCB Part Number: C596497; Supplier 1: LCSC; Category: Ferrite Beads; Supplier Part Number 1: C596497; Tolerance: ±25%; Rated Current: 300mA; DC Resistance: 200mΩ; RoHS: Yes; ComponentLink1Description: Datasheet; ComponentLink1URL: https://wmsc.lcsc.com/wmsc/upload/file/pdf/v2/lcsc/2304140030_Murata-Electronics-BLM15BB220SN1D_C596497.pdf; ComponentLink2Description: JLCPCB Part URL; ComponentLink2URL: https://jlcpcb.com/partdetail/C596497; ComponentLink3Description: LCSC Part URL; ComponentLink3URL: https://lcsc.com/product-detail/Ferrite-Beads_Murata-Electronics-Murata-Electronics-BLM15BB220SN1D_C596497.html
footprint FB-0402 (0402 (1005M) Ferrite)
pins: 1, 2

## BLM15BB221SN1D
designator FB?  Impedance @ Frequency: 220Ω@100MHz
Ferrite, 220Ω@100MHz, ±25%, 800mΩ, 200mA, SMD 0402; Manufacturer: Murata Electronics; Manufacturer Part Number: BLM15BB221SN1D; Package Size: 0402; JLCPCB Basic Part: No; JLCPCB Part Number: C85818; Supplier 1: LCSC; Category: Ferrite Beads; Supplier Part Number 1: C85818; Tolerance: ±25%; Rated Current: 200mA; DC Resistance: 800mΩ; RoHS: Yes; ComponentLink1Description: Datasheet; ComponentLink1URL: https://wmsc.lcsc.com/wmsc/upload/file/pdf/v2/lcsc/2304140030_Murata-Electronics-BLM15BB221SN1D_C85818.pdf; ComponentLink2Description: JLCPCB Part URL; ComponentLink2URL: https://jlcpcb.com/partdetail/C85818; ComponentLink3Description: LCSC Part URL; ComponentLink3URL: https://lcsc.com/product-detail/Ferrite-Beads_Murata-Electronics-Murata-Electronics-BLM15BB221SN1D_C85818.html
footprint FB-0402 (0402 (1005M) Ferrite)
pins: 1, 2

## BLM15BB470SN1D
designator FB?  Impedance @ Frequency: 47Ω@100MHz
Ferrite, 47Ω@100MHz, ±25%, 350mΩ, 300mA, SMD 0402; Manufacturer: Murata Electronics; Manufacturer Part Number: BLM15BB470SN1D; Package Size: 0402; JLCPCB Basic Part: No; JLCPCB Part Number: C76887; Supplier 1: LCSC; Category: Ferrite Beads; Supplier Part Number 1: C76887; Tolerance: ±25%; Rated Current: 300mA; DC Resistance: 350mΩ; RoHS: Yes; ComponentLink1Description: Datasheet; ComponentLink1URL: https://wmsc.lcsc.com/wmsc/upload/file/pdf/v2/lcsc/2304140030_Murata-Electronics-BLM15BB470SN1D_C76887.pdf; ComponentLink2Description: JLCPCB Part URL; ComponentLink2URL: https://jlcpcb.com/partdetail/C76887; ComponentLink3Description: LCSC Part URL; ComponentLink3URL: https://lcsc.com/product-detail/Ferrite-Beads_Murata-Electronics-Murata-Electronics-BLM15BB470SN1D_C76887.html
footprint FB-0402 (0402 (1005M) Ferrite)
pins: 1, 2

## BLM15BB750SH1D
designator FB?  Impedance @ Frequency: 75Ω@100MHz
Ferrite, 75Ω@100MHz, ±25%, 400mΩ, 300mA, SMD 0402; Manufacturer: Murata Electronics; Manufacturer Part Number: BLM15BB750SH1D; Package Size: 0402; JLCPCB Basic Part: No; JLCPCB Part Number: C1852585; Supplier 1: LCSC; Category: Ferrite Beads; Supplier Part Number 1: C1852585; Tolerance: ±25%; Rated Current: 300mA; DC Resistance: 400mΩ; RoHS: Yes; ComponentLink1Description: Datasheet; ComponentLink1URL: https://wmsc.lcsc.com/wmsc/upload/file/pdf/v2/lcsc/2304140030_Murata-Electronics-BLM15BB750SH1D_C1852585.pdf; ComponentLink2Description: JLCPCB Part URL; ComponentLink2URL: https://jlcpcb.com/partdetail/C1852585; ComponentLink3Description: LCSC Part URL; ComponentLink3URL: https://lcsc.com/product-detail/Ferrite-Beads_Murata-Electronics-Murata-Electronics-BLM15BB750SH1D_C1852585.html
footprint FB-0402 (0402 (1005M) Ferrite)
pins: 1, 2

## BLM15BB750SN1D
designator FB?  Impedance @ Frequency: 75Ω@100MHz
Ferrite, 75Ω@100MHz, ±25%, 400mΩ, 300mA, SMD 0402; Manufacturer: Murata Electronics; Manufacturer Part Number: BLM15BB750SN1D; Package Size: 0402; JLCPCB Basic Part: No; JLCPCB Part Number: C82880; Supplier 1: LCSC; Category: Ferrite Beads; Supplier Part Number 1: C82880; Tolerance: ±25%; Rated Current: 300mA; DC Resistance: 400mΩ; RoHS: Yes; ComponentLink1Description: Datasheet; ComponentLink1URL: https://wmsc.lcsc.com/wmsc/upload/file/pdf/v2/lcsc/2304140030_Murata-Electronics-BLM15BB750SN1D_C82880.pdf; ComponentLink2Description: JLCPCB Part URL; ComponentLink2URL: https://jlcpcb.com/partdetail/C82880; ComponentLink3Description: LCSC Part URL; ComponentLink3URL: https://lcsc.com/product-detail/Ferrite-Beads_Murata-Electronics-Murata-Electronics-BLM15BB750SN1D_C82880.html
footprint FB-0402 (0402 (1005M) Ferrite)
pins: 1, 2

## BLM15BC121SN1D
designator FB?  Impedance @ Frequency: 120Ω@100MHz
Ferrite, 120Ω@100MHz, ±25%, 450mΩ, 350mA, SMD 0402; Manufacturer: Murata Electronics; Manufacturer Part Number: BLM15BC121SN1D; Package Size: 0402; JLCPCB Basic Part: No; JLCPCB Part Number: C701306; Supplier 1: LCSC; Category: Ferrite Beads; Supplier Part Number 1: C701306; Tolerance: ±25%; Rated Current: 350mA; DC Resistance: 450mΩ; RoHS: Yes; ComponentLink1Description: Datasheet; ComponentLink1URL: https://wmsc.lcsc.com/wmsc/upload/file/pdf/v2/lcsc/2304140030_Murata-Electronics-BLM15BC121SN1D_C701306.pdf; ComponentLink2Description: JLCPCB Part URL; ComponentLink2URL: https://jlcpcb.com/partdetail/C701306; ComponentLink3Description: LCSC Part URL; ComponentLink3URL: https://lcsc.com/product-detail/Ferrite-Beads_Murata-Electronics-Murata-Electronics-BLM15BC121SN1D_C701306.html
footprint FB-0402 (0402 (1005M) Ferrite)
pins: 1, 2

## BLM15BC241SN1D
designator FB?  Impedance @ Frequency: 240Ω@100MHz
Ferrite, 240Ω@100MHz, ±25%, 700mΩ, 250mA, SMD 0402; Manufacturer: Murata Electronics; Manufacturer Part Number: BLM15BC241SN1D; Package Size: 0402; JLCPCB Basic Part: No; JLCPCB Part Number: C88962; Supplier 1: LCSC; Category: Ferrite Beads; Supplier Part Number 1: C88962; Tolerance: ±25%; Rated Current: 250mA; DC Resistance: 700mΩ; RoHS: Yes; ComponentLink1Description: Datasheet; ComponentLink1URL: https://wmsc.lcsc.com/wmsc/upload/file/pdf/v2/lcsc/2304140030_Murata-Electronics-BLM15BC241SN1D_C88962.pdf; ComponentLink2Description: JLCPCB Part URL; ComponentLink2URL: https://jlcpcb.com/partdetail/C88962; ComponentLink3Description: LCSC Part URL; ComponentLink3URL: https://lcsc.com/product-detail/Ferrite-Beads_Murata-Electronics-Murata-Electronics-BLM15BC241SN1D_C88962.html
footprint FB-0402 (0402 (1005M) Ferrite)
pins: 1, 2

## BLM15BD102SN1D
designator FB?  Impedance @ Frequency: 1kΩ@100MHz
Ferrite, 1kΩ@100MHz, ±25%, 900mΩ, 200mA, SMD 0402; Manufacturer: Murata Electronics; Manufacturer Part Number: BLM15BD102SN1D; Package Size: 0402; JLCPCB Basic Part: No; JLCPCB Part Number: C85819; Supplier 1: LCSC; Category: Ferrite Beads; Supplier Part Number 1: C85819; Tolerance: ±25%; Rated Current: 200mA; DC Resistance: 900mΩ; RoHS: Yes; ComponentLink1Description: Datasheet; ComponentLink1URL: https://wmsc.lcsc.com/wmsc/upload/file/pdf/v2/lcsc/2304140030_Murata-Electronics-BLM15BD102SN1D_C85819.pdf; ComponentLink2Description: JLCPCB Part URL; ComponentLink2URL: https://jlcpcb.com/partdetail/C85819; ComponentLink3Description: LCSC Part URL; ComponentLink3URL: https://lcsc.com/product-detail/Ferrite-Beads_Murata-Electronics-Murata-Electronics-BLM15BD102SN1D_C85819.html
footprint FB-0402 (0402 (1005M) Ferrite)
pins: 1, 2

## BLM15BD121SN1D
designator FB?  Impedance @ Frequency: 120Ω@100MHz
Ferrite, 120Ω@100MHz, 300mΩ, SMD 0402; Manufacturer: Murata Electronics; Manufacturer Part Number: BLM15BD121SN1D; Package Size: 0402; JLCPCB Basic Part: No; JLCPCB Part Number: C337874; Supplier 1: LCSC; Category: Ferrite Beads; Supplier Part Number 1: C337874; DC Resistance: 300mΩ; RoHS: Yes; ComponentLink1Description: Datasheet; ComponentLink1URL: https://wmsc.lcsc.com/wmsc/upload/file/pdf/v2/lcsc/2304140030_Murata-Electronics-BLM15BD121SN1D_C337874.pdf; ComponentLink2Description: JLCPCB Part URL; ComponentLink2URL: https://jlcpcb.com/partdetail/C337874; ComponentLink3Description: LCSC Part URL; ComponentLink3URL: https://lcsc.com/product-detail/Ferrite-Beads_Murata-Electronics-Murata-Electronics-BLM15BD121SN1D_C337874.html
footprint FB-0402 (0402 (1005M) Ferrite)
pins: 1, 2

## BLM15BD182SH1D
designator FB?  Impedance @ Frequency: 1.8kΩ@100MHz
Ferrite, 1.8kΩ@100MHz, ±25%, 1.4Ω, 200mA, SMD 0402; Manufacturer: Murata Electronics; Manufacturer Part Number: BLM15BD182SH1D; Package Size: 0402; JLCPCB Basic Part: No; JLCPCB Part Number: C396655; Supplier 1: LCSC; Category: Ferrite Beads; Supplier Part Number 1: C396655; Tolerance: ±25%; Rated Current: 200mA; DC Resistance: 1.4Ω; RoHS: Yes; ComponentLink1Description: Datasheet; ComponentLink1URL: https://wmsc.lcsc.com/wmsc/upload/file/pdf/v2/lcsc/2304140030_Murata-Electronics-BLM15BD182SH1D_C396655.pdf; ComponentLink2Description: JLCPCB Part URL; ComponentLink2URL: https://jlcpcb.com/partdetail/C396655; ComponentLink3Description: LCSC Part URL; ComponentLink3URL: https://lcsc.com/product-detail/Ferrite-Beads_Murata-Electronics-Murata-Electronics-BLM15BD182SH1D_C396655.html
footprint FB-0402 (0402 (1005M) Ferrite)
pins: 1, 2

## BLM15BD182SN1D
designator FB?  Impedance @ Frequency: 1.8kΩ@100MHz
Ferrite, 1.8kΩ@100MHz, ±25%, 1.4Ω, 100mA, SMD 0402; Manufacturer: Murata Electronics; Manufacturer Part Number: BLM15BD182SN1D; Package Size: 0402; JLCPCB Basic Part: No; JLCPCB Part Number: C85820; Supplier 1: LCSC; Category: Ferrite Beads; Supplier Part Number 1: C85820; Tolerance: ±25%; Rated Current: 100mA; DC Resistance: 1.4Ω; RoHS: Yes; ComponentLink1Description: Datasheet; ComponentLink1URL: https://wmsc.lcsc.com/wmsc/upload/file/pdf/v2/lcsc/2304140030_Murata-Electronics-BLM15BD182SN1D_C85820.pdf; ComponentLink2Description: JLCPCB Part URL; ComponentLink2URL: https://jlcpcb.com/partdetail/C85820; ComponentLink3Description: LCSC Part URL; ComponentLink3URL: https://lcsc.com/product-detail/Ferrite-Beads_Murata-Electronics-Murata-Electronics-BLM15BD182SN1D_C85820.html
footprint FB-0402 (0402 (1005M) Ferrite)
pins: 1, 2

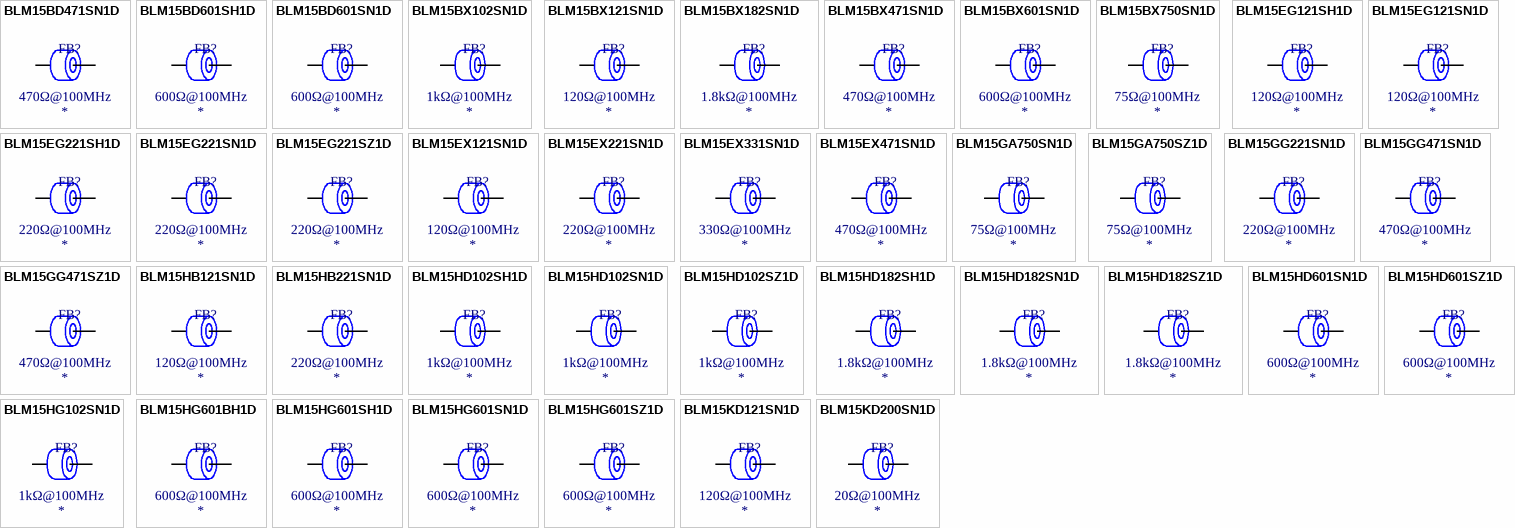
[diagram p7: symbols BLM15BD471SN1D to BLM15KD200SN1D]

## BLM15BD471SN1D
designator FB?  Impedance @ Frequency: 470Ω@100MHz
Ferrite, 470Ω@100MHz, ±25%, 600mΩ, 200mA, SMD 0402; Manufacturer: Murata Electronics; Manufacturer Part Number: BLM15BD471SN1D; Package Size: 0402; JLCPCB Basic Part: No; JLCPCB Part Number: C77600; Supplier 1: LCSC; Category: Ferrite Beads; Supplier Part Number 1: C77600; Tolerance: ±25%; Rated Current: 200mA; DC Resistance: 600mΩ; RoHS: Yes; ComponentLink1Description: Datasheet; ComponentLink1URL: https://wmsc.lcsc.com/wmsc/upload/file/pdf/v2/lcsc/2304140030_Murata-Electronics-BLM15BD471SN1D_C77600.pdf; ComponentLink2Description: JLCPCB Part URL; ComponentLink2URL: https://jlcpcb.com/partdetail/C77600; ComponentLink3Description: LCSC Part URL; ComponentLink3URL: https://lcsc.com/product-detail/Ferrite-Beads_Murata-Electronics-Murata-Electronics-BLM15BD471SN1D_C77600.html
footprint FB-0402 (0402 (1005M) Ferrite)
pins: 1, 2

## BLM15BD601SH1D
designator FB?  Impedance @ Frequency: 600Ω@100MHz
Ferrite, 600Ω@100MHz, ±25%, 650mΩ, 200mA, SMD 0402; Manufacturer: Murata Electronics; Manufacturer Part Number: BLM15BD601SH1D; Package Size: 0402; JLCPCB Basic Part: No; JLCPCB Part Number: C710334; Supplier 1: LCSC; Category: Ferrite Beads; Supplier Part Number 1: C710334; Tolerance: ±25%; Rated Current: 200mA; DC Resistance: 650mΩ; RoHS: Yes; ComponentLink1Description: Datasheet; ComponentLink1URL: https://wmsc.lcsc.com/wmsc/upload/file/pdf/v2/lcsc/2304140030_Murata-Electronics-BLM15BD601SH1D_C710334.pdf; ComponentLink2Description: JLCPCB Part URL; ComponentLink2URL: https://jlcpcb.com/partdetail/C710334; ComponentLink3Description: LCSC Part URL; ComponentLink3URL: https://lcsc.com/product-detail/Ferrite-Beads_Murata-Electronics-Murata-Electronics-BLM15BD601SH1D_C710334.html
footprint FB-0402 (0402 (1005M) Ferrite)
pins: 1, 2

## BLM15BD601SN1D
designator FB?  Impedance @ Frequency: 600Ω@100MHz
Ferrite, 600Ω@100MHz, ±25%, 650mΩ, 200mA, SMD 0402; Manufacturer: Murata Electronics; Manufacturer Part Number: BLM15BD601SN1D; Package Size: 0402; JLCPCB Basic Part: No; JLCPCB Part Number: C337875; Supplier 1: LCSC; Category: Ferrite Beads; Supplier Part Number 1: C337875; Tolerance: ±25%; Rated Current: 200mA; DC Resistance: 650mΩ; RoHS: Yes; ComponentLink1Description: Datasheet; ComponentLink1URL: https://wmsc.lcsc.com/wmsc/upload/file/pdf/v2/lcsc/2012071938_Murata-Electronics-BLM15BD601SN1D_C337875.pdf; ComponentLink2Description: JLCPCB Part URL; ComponentLink2URL: https://jlcpcb.com/partdetail/C337875; ComponentLink3Description: LCSC Part URL; ComponentLink3URL: https://lcsc.com/product-detail/Ferrite-Beads_Murata-Electronics-Murata-Electronics-BLM15BD601SN1D_C337875.html
footprint FB-0402 (0402 (1005M) Ferrite)
pins: 1, 2

## BLM15BX102SN1D
designator FB?  Impedance @ Frequency: 1kΩ@100MHz
Ferrite, 1kΩ@100MHz, ±25%, 650mΩ, 300mA, SMD 0402; Manufacturer: Murata Electronics; Manufacturer Part Number: BLM15BX102SN1D; Package Size: 0402; JLCPCB Basic Part: No; JLCPCB Part Number: C269769; Supplier 1: LCSC; Category: Ferrite Beads; Supplier Part Number 1: C269769; Tolerance: ±25%; Rated Current: 300mA; DC Resistance: 650mΩ; RoHS: Yes; ComponentLink1Description: Datasheet; ComponentLink1URL: https://wmsc.lcsc.com/wmsc/upload/file/pdf/v2/lcsc/2304140030_Murata-Electronics-BLM15BX102SN1D_C269769.pdf; ComponentLink2Description: JLCPCB Part URL; ComponentLink2URL: https://jlcpcb.com/partdetail/C269769; ComponentLink3Description: LCSC Part URL; ComponentLink3URL: https://lcsc.com/product-detail/Ferrite-Beads_Murata-Electronics-Murata-Electronics-BLM15BX102SN1D_C269769.html
footprint FB-0402 (0402 (1005M) Ferrite)
pins: 1, 2

## BLM15BX121SN1D
designator FB?  Impedance @ Frequency: 120Ω@100MHz
Ferrite, 120Ω@100MHz, ±25%, 170mΩ, 600mA, SMD 0402; Manufacturer: Murata Electronics; Manufacturer Part Number: BLM15BX121SN1D; Package Size: 0402; JLCPCB Basic Part: No; JLCPCB Part Number: C710335; Supplier 1: LCSC; Category: Ferrite Beads; Supplier Part Number 1: C710335; Tolerance: ±25%; Rated Current: 600mA; DC Resistance: 170mΩ; RoHS: Yes; ComponentLink1Description: Datasheet; ComponentLink1URL: https://wmsc.lcsc.com/wmsc/upload/file/pdf/v2/lcsc/2304140030_Murata-Electronics-BLM15BX121SN1D_C710335.pdf; ComponentLink2Description: JLCPCB Part URL; ComponentLink2URL: https://jlcpcb.com/partdetail/C710335; ComponentLink3Description: LCSC Part URL; ComponentLink3URL: https://lcsc.com/product-detail/Ferrite-Beads_Murata-Electronics-Murata-Electronics-BLM15BX121SN1D_C710335.html
footprint FB-0402 (0402 (1005M) Ferrite)
pins: 1, 2

## BLM15BX182SN1D
designator FB?  Impedance @ Frequency: 1.8kΩ@100MHz
Ferrite, 1.8kΩ@100MHz, ±25%, 900mΩ, 250mA, SMD 0402; Manufacturer: Murata Electronics; Manufacturer Part Number: BLM15BX182SN1D; Package Size: 0402; JLCPCB Basic Part: No; JLCPCB Part Number: C701292; Supplier 1: LCSC; Category: Ferrite Beads; Supplier Part Number 1: C701292; Tolerance: ±25%; Rated Current: 250mA; DC Resistance: 900mΩ; RoHS: Yes; ComponentLink1Description: Datasheet; ComponentLink1URL: https://wmsc.lcsc.com/wmsc/upload/file/pdf/v2/lcsc/2304140030_Murata-Electronics-BLM15BX182SN1D_C701292.pdf; ComponentLink2Description: JLCPCB Part URL; ComponentLink2URL: https://jlcpcb.com/partdetail/C701292; ComponentLink3Description: LCSC Part URL; ComponentLink3URL: https://lcsc.com/product-detail/Ferrite-Beads_Murata-Electronics-Murata-Electronics-BLM15BX182SN1D_C701292.html
footprint FB-0402 (0402 (1005M) Ferrite)
pins: 1, 2

## BLM15BX471SN1D
designator FB?  Impedance @ Frequency: 470Ω@100MHz
Ferrite, 470Ω@100MHz, ±25%, 410mΩ, 350mA, SMD 0402; Manufacturer: Murata Electronics; Manufacturer Part Number: BLM15BX471SN1D; Package Size: 0402; JLCPCB Basic Part: No; JLCPCB Part Number: C2661901; Supplier 1: LCSC; Category: Ferrite Beads; Supplier Part Number 1: C2661901; Tolerance: ±25%; Rated Current: 350mA; DC Resistance: 410mΩ; RoHS: Yes; ComponentLink1Description: Datasheet; ComponentLink1URL: https://wmsc.lcsc.com/wmsc/upload/file/pdf/v2/lcsc/2202131730_Murata-Electronics-BLM15BX471SN1D_C2661901.pdf; ComponentLink2Description: JLCPCB Part URL; ComponentLink2URL: https://jlcpcb.com/partdetail/C2661901; ComponentLink3Description: LCSC Part URL; ComponentLink3URL: https://lcsc.com/product-detail/Ferrite-Beads_Murata-Electronics-Murata-Electronics-BLM15BX471SN1D_C2661901.html
footprint FB-0402 (0402 (1005M) Ferrite)
pins: 1, 2

## BLM15BX601SN1D
designator FB?  Impedance @ Frequency: 600Ω@100MHz
Ferrite, 600Ω@100MHz, ±25%, 460mΩ, 350mA, SMD 0402; Manufacturer: Murata Electronics; Manufacturer Part Number: BLM15BX601SN1D; Package Size: 0402; JLCPCB Basic Part: No; JLCPCB Part Number: C710336; Supplier 1: LCSC; Category: Ferrite Beads; Supplier Part Number 1: C710336; Tolerance: ±25%; Rated Current: 350mA; DC Resistance: 460mΩ; RoHS: Yes; ComponentLink1Description: Datasheet; ComponentLink1URL: https://wmsc.lcsc.com/wmsc/upload/file/pdf/v2/lcsc/2304140030_Murata-Electronics-BLM15BX601SN1D_C710336.pdf; ComponentLink2Description: JLCPCB Part URL; ComponentLink2URL: https://jlcpcb.com/partdetail/C710336; ComponentLink3Description: LCSC Part URL; ComponentLink3URL: https://lcsc.com/product-detail/Ferrite-Beads_Murata-Electronics-Murata-Electronics-BLM15BX601SN1D_C710336.html
footprint FB-0402 (0402 (1005M) Ferrite)
pins: 1, 2